# Altium footprint library 2020-05-02_11-58-54.PcbLib: 3 footprints
Each footprint in its own frame and in the unit in brackets; x right, y up, seen from the top. Pads: shape width x height; smd on the part's side, far side on the other; paste and mask are expansions set on the pad; w line width, h text height; cw(c..) or ccw(c..) is an arc to the next point about the centre after c.
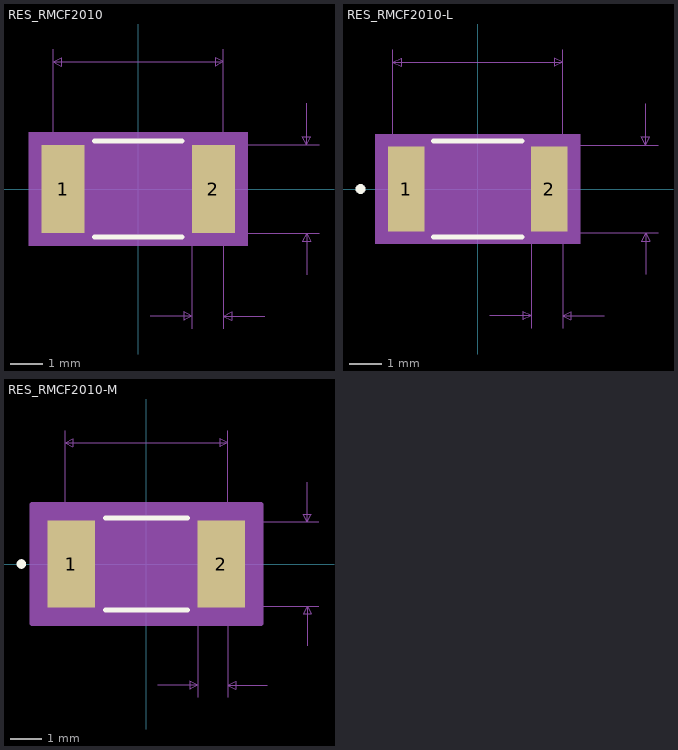
[diagram p0: the footprints below, top view; thin cyan lines are the x and y axes]

## RES_RMCF2010 [mil]
pads (2):
  rect 52x106 smd paste+0 mask+0: 1(-90.5,0) 2(90.5,0)
Top Overlay:
  lines w6: -52.39,-58 52.39,-58 ; -52.39,58 52.39,58
Mechanical 5:
  region: 131.5,-68 -131.5,-68 -131.5,68 131.5,68
Mechanical 7:
  lines w1: -102.5,0 -102.5,168 ; 0,-53 217.5,-53 ; 0,53 217.5,53 ; 14.5,-153 64.5,-153 ; 64.5,-168 64.5,0 ; 102.5,-168 102.5,0 102.5,168 ; 152.5,-153 102.5,-153 ; 202.5,-103 202.5,-53 ; 202.5,103 202.5,53 ; -102.5,153 102.5,153 ; -102.5,153 -92.5,158 -92.5,148 -102.5,153 ; 64.5,-153 54.5,-148 54.5,-158 64.5,-153 ; 102.5,-153 112.5,-148 112.5,-158 102.5,-153 ; 102.5,153 92.5,158 92.5,148 102.5,153 ; 202.5,-53 197.5,-63 207.5,-63 202.5,-53 ; 202.5,53 197.5,63 207.5,63 202.5,53
  text "Default Padstyle: RX52Y106D0T" at -362.5,-323 h50
  text "Alternate 1 Padstyle: OX60Y90D30P" at -412.5,-423 h50
  text "Alternate 2 Padstyle: OX90Y60D30P" at -412.5,-523 h50
  text "0.106in/2.692mm" at 222.5,-12.5 h25
  text "0.205in/5.207mm" at -93.75,173 h25
  text "0.038in/0.965mm" at -10.25,-198 h25
Mechanical 13:
  circle w0: c-85.5,0 r0
  lines w1: -102.5,-53 -102.5,53 ; -102.5,-53 -64.5,-53 -64.5,53 -102.5,53 ; -102.5,-53 102.5,-53 ; -102.5,-53 -102.5,53 ; -102.5,53 102.5,53 ; 102.5,-53 64.5,-53 64.5,53 102.5,53 ; 102.5,-53 102.5,53 ; 102.5,-53 102.5,53
Mechanical 15:
  region: 126.5,-63 -126.5,-63 -126.5,63 126.5,63
  lines w6: -126.5,-63 -126.5,63 126.5,63 126.5,-63 -126.5,-63
3D body: height 10, standoff 0, extent 0,0 10,10

## RES_RMCF2010-L [mil]
pads (2):
  rect 44x102 smd paste+0 mask+0: 1(-86.5,0) 2(86.5,0)
Top Overlay:
  circle w6: c-141.5,0 r3
  lines w6: -53.43,-58 53.43,-58 ; -53.43,58 53.43,58
Mechanical 5:
  region: 123.5,-66 -123.5,-66 -123.5,66 123.5,66
Mechanical 7:
  lines w1: -102.5,0 -102.5,168 ; 0,-53 217.5,-53 ; 0,53 217.5,53 ; 14.5,-153 64.5,-153 ; 64.5,-168 64.5,0 ; 102.5,-168 102.5,0 102.5,168 ; 152.5,-153 102.5,-153 ; 202.5,-103 202.5,-53 ; 202.5,103 202.5,53 ; -102.5,153 102.5,153 ; -102.5,153 -92.5,158 -92.5,148 -102.5,153 ; 64.5,-153 54.5,-148 54.5,-158 64.5,-153 ; 102.5,-153 112.5,-148 112.5,-158 102.5,-153 ; 102.5,153 92.5,158 92.5,148 102.5,153 ; 202.5,-53 197.5,-63 207.5,-63 202.5,-53 ; 202.5,53 197.5,63 207.5,63 202.5,53
  text "Default Padstyle: RX44Y102D0T" at -362.5,-321 h50
  text "Alternate 1 Padstyle: OX60Y90D30P" at -412.5,-421 h50
  text "Alternate 2 Padstyle: OX90Y60D30P" at -412.5,-521 h50
  text "0.106in/2.692mm" at 222.5,-12.5 h25
  text "0.205in/5.207mm" at -93.75,173 h25
  text "0.038in/0.965mm" at -10.25,-198 h25
Mechanical 13:
  circle w0: c-81.5,0 r3
  lines w1: -102.5,-53 -102.5,53 ; -102.5,-53 -64.5,-53 -64.5,53 -102.5,53 ; -102.5,-53 102.5,-53 ; -102.5,-53 -102.5,53 ; -102.5,53 102.5,53 ; 102.5,-53 64.5,-53 64.5,53 102.5,53 ; 102.5,-53 102.5,53 ; 102.5,-53 102.5,53
Mechanical 15:
  region: 112.5,-55 -112.5,-55 -112.5,55 112.5,55
  lines w6: -112.5,-55 -112.5,55 112.5,55 112.5,-55 -112.5,-55
3D body: height 10, standoff 0, extent 0,0 10,10

## RES_RMCF2010-M [mil]
pads (2):
  rect 60x110 smd paste+0 mask+0: 1(-94.5,0) 2(94.5,0)
Top Overlay:
  circle w6: c-157.5,0 r3
  lines w6: -51.75,-58 51.75,-58 ; -51.75,58 51.75,58
Mechanical 5:
  region: 139.5,-70 -139.5,-70 -139.5,70 139.5,70
Mechanical 7:
  lines w1: -102.5,0 -102.5,168 ; 0,-53 217.5,-53 ; 0,53 217.5,53 ; 14.5,-153 64.5,-153 ; 64.5,-168 64.5,0 ; 102.5,-168 102.5,0 102.5,168 ; 152.5,-153 102.5,-153 ; 202.5,-103 202.5,-53 ; 202.5,103 202.5,53 ; -102.5,153 102.5,153 ; -102.5,153 -92.5,158 -92.5,148 -102.5,153 ; 64.5,-153 54.5,-148 54.5,-158 64.5,-153 ; 102.5,-153 112.5,-148 112.5,-158 102.5,-153 ; 102.5,153 92.5,158 92.5,148 102.5,153 ; 202.5,-53 197.5,-63 207.5,-63 202.5,-53 ; 202.5,53 197.5,63 207.5,63 202.5,53
  text "Default Padstyle: RX60Y110D0T" at -362.5,-325 h50
  text "Alternate 1 Padstyle: OX60Y90D30P" at -412.5,-425 h50
  text "Alternate 2 Padstyle: OX90Y60D30P" at -412.5,-525 h50
  text "0.106in/2.692mm" at 222.5,-12.5 h25
  text "0.205in/5.207mm" at -93.75,173 h25
  text "0.038in/0.965mm" at -10.25,-198 h25
Mechanical 13:
  circle w0: c-89.5,0 r3
  lines w1: -102.5,-53 -102.5,53 ; -102.5,-53 -64.5,-53 -64.5,53 -102.5,53 ; -102.5,-53 102.5,-53 ; -102.5,-53 -102.5,53 ; -102.5,53 102.5,53 ; 102.5,-53 64.5,-53 64.5,53 102.5,53 ; 102.5,-53 102.5,53 ; 102.5,-53 102.5,53
Mechanical 15:
  region: 144.5,-75 -144.5,-75 -144.5,75 144.5,75
  lines w6: -144.5,-75 -144.5,75 144.5,75 144.5,-75 -144.5,-75
3D body: height 10, standoff 0, extent 0,0 10,10